# Altium footprint library aeronist-Footprint-Lib.PcbLib: 67 footprints (part 3 of 5)
Each footprint in its own frame and in the unit in brackets; x right, y up, seen from the top. Pads: shape width x height; smd on the part's side, far side on the other; paste and mask are expansions set on the pad; w line width, h text height; cw(c..) or ccw(c..) is an arc to the next point about the centre after c.
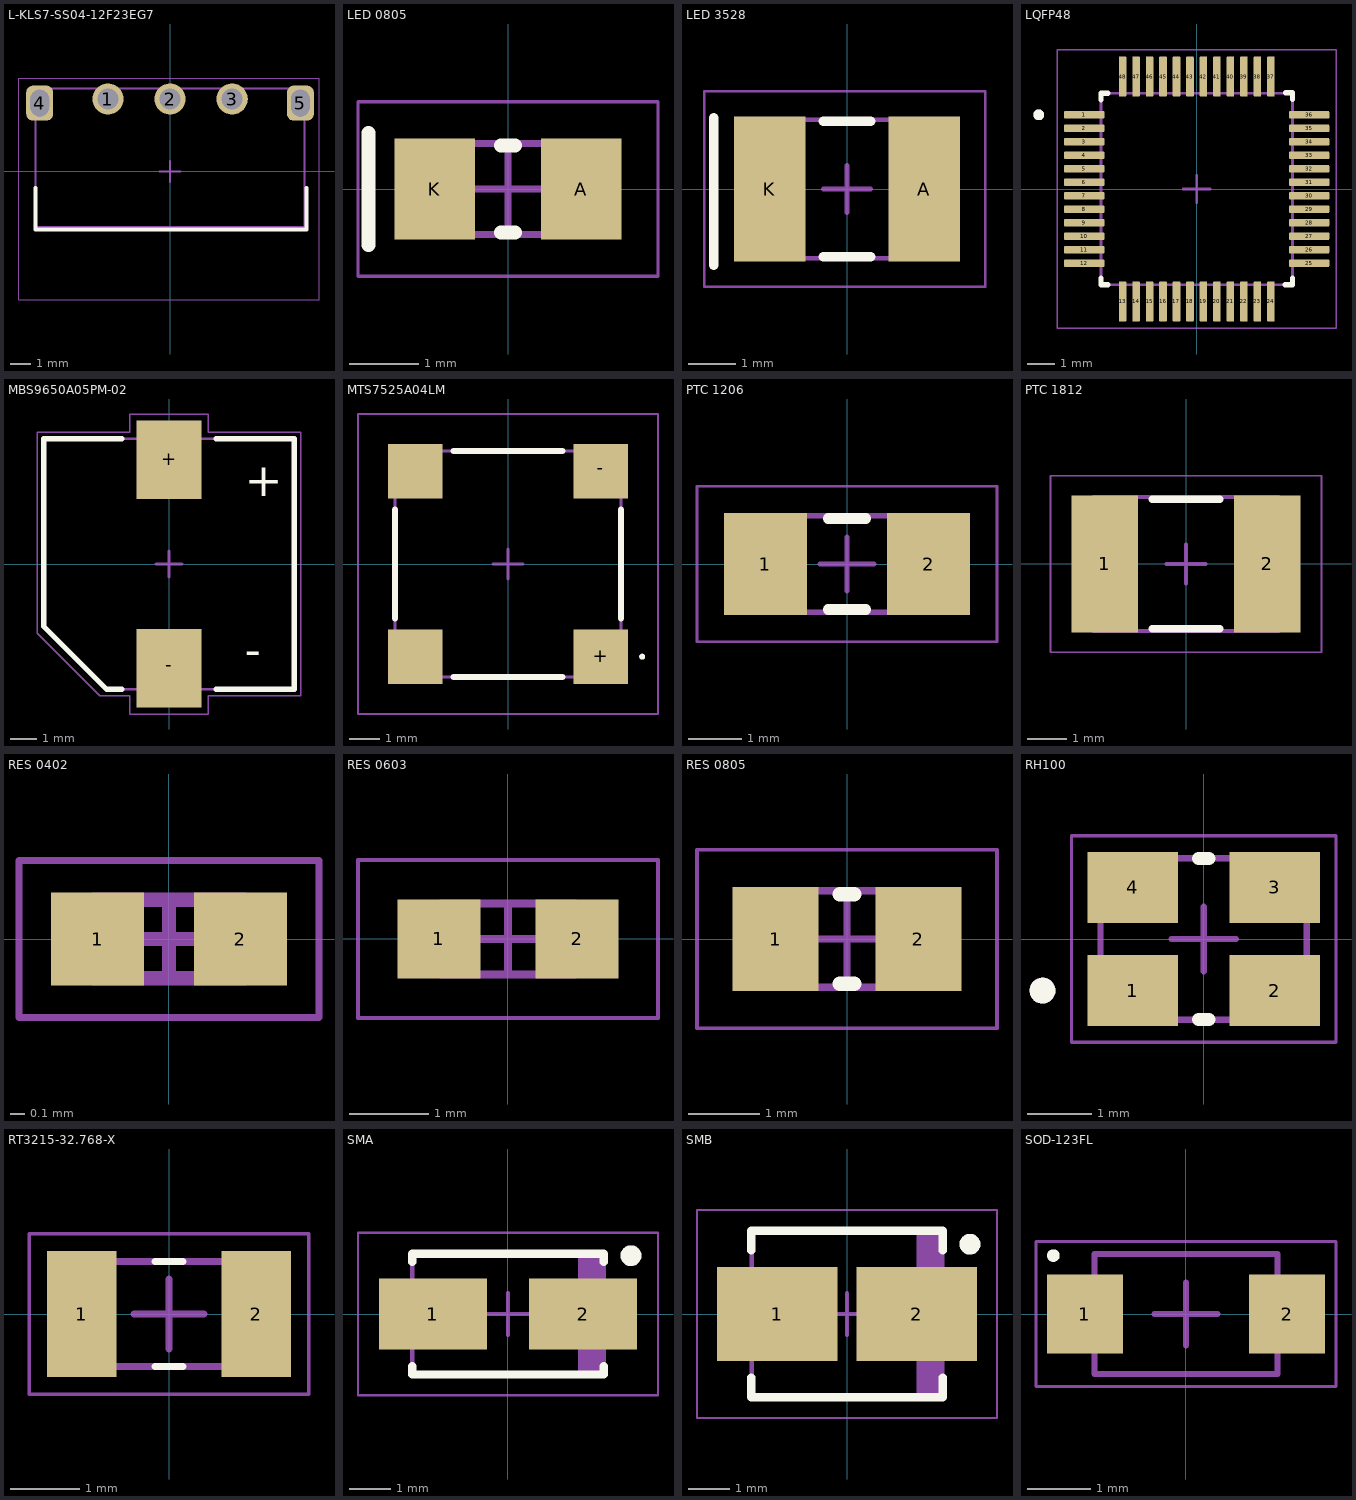
[diagram p2: the footprints below, top view; thin cyan lines are the x and y axes]

## L-KLS7-SS04-12F23EG7 [mm] "Slide switch SPDT (ON-ON), through-hole, 3 pins, right-angle type."
pads (5):
  round 1.515 hole 1.01: 1(-3,3.5) 2(0,3.5) 3(3,3.5)
  rrect50% 1.3x1.7 hole 0.9 slot 1.3 at 90 deg: 4(-6.3,3.3) 5(6.3,3.3)
Top Overlay:
  lines w0.2: -6.5,-0.8 -6.5,-2.8 6.6,-2.8 6.6,-0.8
Top Assembly:
  lines w0.1: -6.5,-2.7 6.5,-2.7 6.5,4 -6.5,4 -6.5,-2.7
Top Courtyard:
  lines w0.05: -7.3,-6.2 -7.3,4.5 7.2,4.5 7.2,-6.2 -7.3,-6.2
  lines w0.1: -0.5,0 0.5,0 ; 0,-0.5 0,0.5
3D body "KLS7-SS04-12F23.stp": height 5.7, standoff -3.1, extent -6.5,-6 6.5,4

## LED 0805 [mm] "Chip LED, 2-Leads, Body 2,00x1,25mm, IPC Low Density"
height 0.71
pads (2):
  rect 1.15x1.45 smd: A(1.05,0) K(-1.05,0)
Top Overlay:
  lines w0.2: -2,-0.8 -2,0.8 ; -0.1,-0.625 0.1,-0.625 ; -0.1,0.625 0.1,0.625
Top Assembly:
  lines w0.1: -1.04,-0.65 -1.04,0.65 1.04,0.65 1.04,-0.65 -1.04,-0.65
Top Courtyard:
  lines w0.05: -2.15,-1.25 -2.15,1.25 2.15,1.25 2.15,-1.25 -2.15,-1.25
  lines w0.1: -0.5,0 0.5,0 ; 0,-0.5 0,0.5
3D body "LED_0805.step": height 0.8, standoff -0.01, extent -1,-0.625 1,0.625

## LED 3528 [mm] "Chip LED, 2-Leads, Body 3,50x2,80mm, IPC Low Density"
height 1.46
pads (2):
  rect 1.5x3.05 smd: A(1.625,0) K(-1.625,0)
Top Overlay:
  lines w0.2: -2.8,-1.6 -2.8,1.5 ; -0.5,-1.425 0.5,-1.425 ; -0.5,1.425 0.5,1.425
Top Assembly:
  lines w0.1: -1.82,-1.455 -1.82,1.455 1.82,1.455 1.82,-1.455 -1.82,-1.455
Top Courtyard:
  lines w0.05: -3,-2.05 -3,2.05 2.9,2.05 2.9,-2.05 -3,-2.05
  lines w0.1: -0.5,0 0.5,0 ; 0,-0.5 0,0.5
3D body "LED_3528.SLDPRT": height 1.75, standoff -0.05, extent -1.651,-1.4 1.851,1.4

## LQFP48 [mm] "LQFP48, 48-Leads, Body 7x7mm, Pitch 0,5mm, IPC Low Density"
pads (48):
  rrect25% 1.49x0.28 smd: 1(-4.17,2.75) 2(-4.17,2.25) 3(-4.17,1.75) 4(-4.17,1.25) 5(-4.17,0.75) 6(-4.17,0.25) 7(-4.17,-0.25) 8(-4.17,-0.75) 9(-4.17,-1.25) 10(-4.17,-1.75) 11(-4.17,-2.25) 12(-4.17,-2.75) 25(4.17,-2.75) 26(4.17,-2.25) 27(4.17,-1.75) 28(4.17,-1.25) 29(4.17,-0.75) 30(4.17,-0.25) 31(4.17,0.25) 32(4.17,0.75) 33(4.17,1.25) 34(4.17,1.75) 35(4.17,2.25) 36(4.17,2.75)
  rrect25% 0.28x1.49 smd: 13(-2.75,-4.17) 14(-2.25,-4.17) 15(-1.75,-4.17) 16(-1.25,-4.17) 17(-0.75,-4.17) 18(-0.25,-4.17) 19(0.25,-4.17) 20(0.75,-4.17) 21(1.25,-4.17) 22(1.75,-4.17) 23(2.25,-4.17) 24(2.75,-4.17) 37(2.75,4.17) 38(2.25,4.17) 39(1.75,4.17) 40(1.25,4.17) 41(0.75,4.17) 42(0.25,4.17) 43(-0.25,4.17) 44(-0.75,4.17) 45(-1.25,4.17) 46(-1.75,4.17) 47(-2.25,4.17) 48(-2.75,4.17)
Top Overlay:
  circle w0.2: c-5.86,2.75 r0.1
  lines w0.2: -3.55,-3.3 -3.55,-3.55 -3.3,-3.55 ; -3.55,3.3 -3.55,3.55 -3.3,3.55 ; 3.275,-3.55 3.525,-3.55 ; 3.3,3.575 3.55,3.575 3.55,3.325 ; 3.55,-3.55 3.55,-3.3 ; 3.55,3.35 3.55,3.55
Top Assembly:
  lines w0.1: -3.55,-3.55 3.55,-3.55 3.55,3.55 -3.55,3.55 -3.55,-3.55
Top Courtyard:
  lines w0.05: -5.165,-5.165 -5.165,5.165 5.165,5.165 5.165,-5.165 -5.165,-5.165
  lines w0.1: -0.5,0 0.5,0 ; 0,-0.5 0,0.5
Mechanical 13:
  circle w0.2: c-5.86,2.75 r0.1
3D body "LQFP48.STEP": height 1.5, standoff 0, extent -4.513,-4.513 4.513,4.513

## MBS9650A05PM-02 [mm]
pads (2):
  rect 2.5x3 smd: +(0,4) -(0,-4)
Top Overlay:
  lines w0.2: -1.8,-4.8 -2.4,-4.8 -4.8,-2.4 -4.8,4.8 -1.8,4.8 ; 1.8,-4.8 4.8,-4.8 4.8,4.8 1.8,4.8
  text "+" at 2.9,2.6 h1.28
  text "-" at 2.9,-3.9 h1.28
Top Assembly:
  lines w0.1: -4.8,-2.4 -4.8,4.8 4.8,4.8 4.8,-4.8 -2.4,-4.8 -4.8,-2.4
Top Courtyard:
  lines w0.05: -5.05,-2.65 -2.65,-5.05 -1.5,-5.05 -1.5,-5.75 1.5,-5.75 1.5,-5.05 5.05,-5.05 5.05,5.05 1.5,5.05 1.5,5.75 -1.5,5.75 -1.5,5.05 -5.05,5.05 -5.05,-2.65
  lines w0.1: -0.5,0 0.5,0 ; 0,-0.5 0,0.5
3D body "step_temp.STEP": height 4.86, standoff -0.14, extent -4.8,-5 4.8,5

## MTS7525A04LM [mm]
pads (4):
  rect 1.8x1.8 smd: +(3.075,-3.075) -(3.075,3.075) ""(-3.075,-3.075) ""(-3.075,3.075)
Top Overlay:
  lines w0.1: 4.4,-3.075 cw(c4.45,-3.075) 4.5,-3.075 cw(c4.45,-3.075) 4.4,-3.075
  lines w0.2: -3.75,-1.8 -3.75,1.8 ; -1.8,-3.75 1.8,-3.75 ; -1.8,3.75 1.8,3.75 ; 3.75,-1.8 3.75,1.8
Top Assembly:
  lines w0.1: -3.75,-3.75 3.75,-3.75 3.75,3.75 -3.75,3.75 -3.75,-3.75
Top Courtyard:
  lines w0.05: -4.975,-4.975 -4.975,4.975 4.975,4.975 4.975,-4.975 -4.975,-4.975
  lines w0.1: -0.5,0 0.5,0 ; 0,-0.5 0,0.5
3D body "MTS7525A04LM.stp": height 2.5, standoff 0, extent -3.75,-3.75 3.75,3.75

## PTC 1206 [mm] "Chip PTC, 2-Leads, Body 3,25x1,65mm, IPC Low Density"
height 1.2
pads (2):
  rect 1.55x1.9 smd: 1(-1.525,0) 2(1.525,0)
Top Overlay:
  lines w0.2: -0.35,-0.85 0.35,-0.85 ; -0.35,0.85 0.35,0.85
Top Assembly:
  lines w0.1: -1.75,-0.9 1.75,-0.9 1.75,0.9 -1.75,0.9 -1.75,-0.9
Top Courtyard:
  lines w0.05: -2.8,-1.45 2.8,-1.45 2.8,1.45 -2.8,1.45 -2.8,-1.45
  lines w0.1: -0.5,0 0.5,0 ; 0,-0.5 0,0.5
3D body "PTC_1206.stp": height 1, standoff 0, extent -1.6,-0.827 1.6,0.827

## PTC 1812 [mm] "Chip PTC, 2-Leads, Body 4,55x3,24mm, IPC Low Density"
height 1
pads (2):
  rect 1.7x3.5 smd: 1(-2.075,0) 2(2.075,0)
Top Overlay:
  lines w0.2: -0.85,-1.65 0.85,-1.65 ; -0.85,1.65 0.85,1.65
Top Assembly:
  lines w0.1: -2.365,-1.705 -2.365,1.705 2.365,1.705 2.365,-1.705 -2.365,-1.705
Top Courtyard:
  lines w0.05: -3.45,-2.25 -3.45,2.25 3.45,2.25 3.45,-2.25 -3.45,-2.25
  lines w0.1: -0.5,0 0.5,0 ; 0,-0.5 0,0.5
3D body "0ZCG0075FF2C.STEP": height 0.7, standoff 0, extent -2.264,-1.622 2.286,1.618

## RES 0402 [mm] "Chip Resistor, 2-Leads, Body 1,00x0,50mm, IPC Low Density"
height 0.4
pads (2):
  rect 0.65x0.65 smd: 1(-0.5,0) 2(0.5,0)
Top Assembly:
  lines w0.1: -0.525,-0.275 0.525,-0.275 0.525,0.275 -0.525,0.275 -0.525,-0.275
Top Courtyard:
  lines w0.05: -1.05,-0.55 -1.05,0.55 1.05,0.55 1.05,-0.55 -1.05,-0.55
  lines w0.1: -0.275,0 0.275,0 ; 0,-0.275 0,0.275
3D body "RES 0402.step": height 0.4, standoff 0, extent -0.525,-0.275 0.525,0.275

## RES 0603 [mm] "Chip Resistor, 2-Leads, Body 1,60x0,80mm, IPC Low Density"
height 0.55
pads (2):
  rect 1.05x1 smd: 1(-0.875,0) 2(0.875,0)
Top Assembly:
  lines w0.1: -0.85,-0.45 0.85,-0.45 0.85,0.45 -0.85,0.45 -0.85,-0.45
Top Courtyard:
  lines w0.05: -1.9,-1 -1.9,1 1.9,1 1.9,-1 -1.9,-1
  lines w0.1: -0.45,0 0.45,0 ; 0,-0.45 0,0.45
3D body "RES 0603.step": height 0.55, standoff 0, extent -0.85,-0.45 0.85,0.45

## RES 0805 [mm] "Chip Resistor, 2-Leads, Body 2,00x1,25mm, IPC Low Density"
height 0.6
pads (2):
  rect 1.2x1.45 smd: 1(-1,0) 2(1,0)
Top Overlay:
  lines w0.2: -0.1,-0.625 0.1,-0.625 ; -0.1,0.625 0.1,0.625
Top Assembly:
  lines w0.1: -1.05,-0.675 -1.05,0.675 1.05,0.675 1.05,-0.675 -1.05,-0.675
Top Courtyard:
  lines w0.05: -2.1,-1.25 -2.1,1.25 2.1,1.25 2.1,-1.25 -2.1,-1.25
  lines w0.1: -0.5,0 0.5,0 ; 0,-0.5 0,0.5
3D body "RES 0805.step": height 0.6, standoff 0, extent -1.05,-0.675 1.05,0.675

## RH100 [mm] "Footprint for RH100 series crystal oscillator 4-pin 8.0×3.8 mm"
pads (4):
  rect 1.4x1.1 smd: 1(-1.1,-0.8) 2(1.1,-0.8) 3(1.1,0.8) 4(-1.1,0.8)
Top Overlay:
  circle w0.2: c-2.5,-0.8 r0.1
  lines w0.2: -0.08,-1.25 0.08,-1.25 ; -0.08,1.25 0.08,1.25
Top Assembly:
  lines w0.1: -1.6,-1.25 1.6,-1.25 1.6,1.25 -1.6,1.25 -1.6,-1.25
Top Courtyard:
  lines w0.05: -2.05,-1.6 2.05,-1.6 2.05,1.6 -2.05,1.6 -2.05,-1.6
  lines w0.1: -0.5,0 0.5,0 ; 0,-0.5 0,0.5
Mechanical 13:
  circle w0.2: c-2.5,-0.8 r0.1
3D body "step_temp.STEP": height 0.8, standoff 0, extent -1.6,-1.25 1.6,1.25

## RT3215-32.768-X [mm] "32.768 kHz ±20ppm Crystal 12.5pF 70 kOhms 2-SMD, No Lead"
pads (2):
  rect 1x1.8 smd: 1(-1.25,0) 2(1.25,0)
Top Overlay:
  lines w0.1: -0.2,-0.75 0.2,-0.75 ; -0.2,0.75 0.2,0.75
Top Assembly:
  lines w0.1: -1.6,-0.75 1.6,-0.75 1.6,0.75 -1.6,0.75 -1.6,-0.75
Top Courtyard:
  lines w0.05: -2,-1.15 2,-1.15 2,1.15 -2,1.15 -2,-1.15
  lines w0.1: -0.5,0 0.5,0 ; 0,-0.5 0,0.5
3D body "step_temp.STEP": height 0.9, standoff 0, extent -1.6,-0.75 1.6,0.75

## SMA [mm] "SMA, 2-Leads, Body 4,28x2,58mm, IPC Low Density"
height 2.45
pads (2):
  rect 2.6x1.7 smd: 1(-1.8,0) 2(1.8,0)
Top Overlay:
  circle w0.25: c2.95,1.4 r0.125
  lines w0.2: -2.3,-1.25 -2.3,-1.45 2.3,-1.45 2.3,-1.25 ; -2.3,1.25 -2.3,1.45 2.3,1.45 2.3,1.25
Top Assembly:
  rectangle: 1.681,-1.45 2.3,1.45
  lines w0.1: -2.3,-1.45 -2.3,1.45 2.3,1.45 2.3,-1.45 -2.3,-1.45
Top Courtyard:
  lines w0.05: -3.6,-1.95 -3.6,1.95 3.6,1.95 3.6,-1.95 -3.6,-1.95
  lines w0.1: -0.5,0 0.5,0 ; 0,-0.5 0,0.5
3D body "SMA1.step": height 2.45, standoff 0, extent -2.52,-1.45 2.52,1.45

## SMB [mm] "SMB, 2-Leads, Body 4,31x3,62mm, IPC Low Density"
height 2.44
pads (2):
  rect 2.9x2.25 smd: 1(-1.675,0) 2(1.675,0)
Top Overlay:
  circle w0.25: c2.95,1.675 r0.125
  lines w0.2: -2.3,-1.525 -2.3,-2 2.3,-2 2.3,-1.525 ; -2.3,1.525 -2.3,2 2.3,2 2.3,1.525
Top Assembly:
  rectangle: 1.67,-1.97 2.285,1.97
  lines w0.1: -2.285,-1.97 2.285,-1.97 2.285,1.97 -2.285,1.97 -2.285,-1.97
Top Courtyard:
  lines w0.05: -3.6,-2.5 3.6,-2.5 3.6,2.5 -3.6,2.5 -3.6,-2.5
  lines w0.1: -0.5,0 0.5,0 ; 0,-0.5 0,0.5
3D body "SMB.step": height 2.44, standoff 0, extent -2.505,-1.97 2.505,1.97

## SOD-123FL [mm] "SOD-123FL, 2-Leads, Body 1,80x3,60mm, IPC Low Density"
height 1.1
pads (2):
  rect 1.2x1.25 smd: 1(-1.6,0) 2(1.6,0)
Top Overlay:
  circle w0.1: c-2.1,0.925 r0.05
Top Assembly:
  lines w0.1: -1.45,-0.95 -1.45,0.95 1.45,0.95 1.45,-0.95 -1.45,-0.95
Top Courtyard:
  lines w0.05: -2.375,-1.15 -2.375,1.15 2.375,1.15 2.375,-1.15 -2.375,-1.15
  lines w0.1: -0.5,0 0.5,0 ; 0,-0.5 0,0.5
3D body "SOD-123FL.step": height 1.1, standoff 0, extent -1.8,-0.95 1.8,0.95